# Altium schematic symbol library Trimers.SchLib: 1 symbol
Pins are listed as number, name and electrical type; pins without a type are passive.

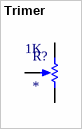
[diagram p0: symbol Trimer]

## Trimer
designator R?  value 1K
Trimer
footprint Trimer1
pins: 1 TOP, 2 BOT, 3 TAP